# Altium schematic symbol library boost_converter_SchLib.SchLib: 9 symbols
Pins are listed as number, name and electrical type; pins without a type are passive.

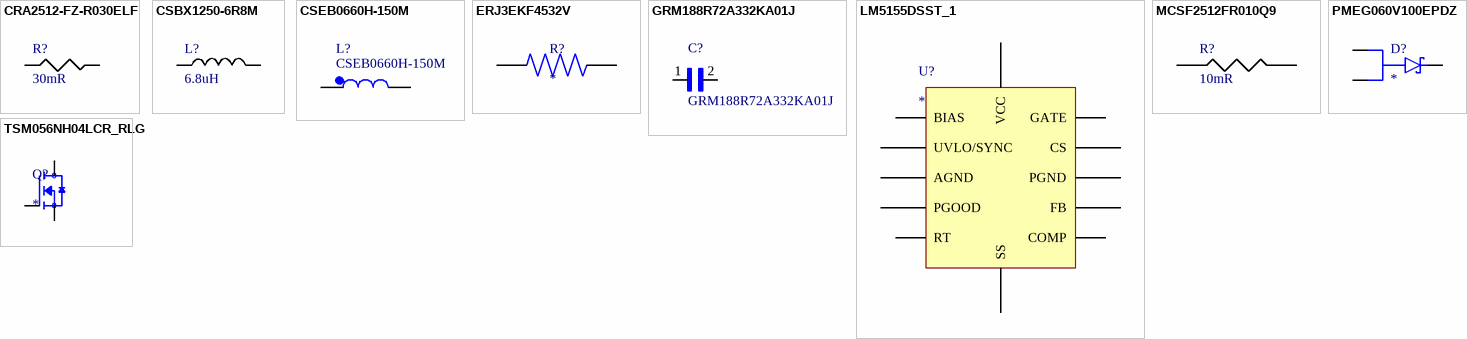
[diagram p0: symbols CRA2512-FZ-R030ELF to TSM056NH04LCR_RLG]

## CRA2512-FZ-R030ELF
designator R?, comment 30mR
Res Metal Alloy 2512 0.03 Ohm 1% 3W ±50ppm/C Pad SMD T/R Automotive AEC-Q200; Manufacturer: Bourns; Manufacturer Part Number: CRA2512-FZ-R030ELF; Value: 30mΩ; Temperature Coefficient: 50ppm/°C; Supplier: Avnet; Supplier Part Number: CRA2512-FZ-R030ELF; RoHS: Compliant; Category: Chip SMD Resistors; Stock: 28000; Pricing: 4000=0.20541, 8000=0.20133, 16000=0.1974, 32000=0.19363, 64000=0.12768 (USD); Case/Package: 2512; Case Code (Imperial): 2512; Case Code (Metric): 6432; China RoHS: Compliant; Composition: Metal Alloy, Metal Strip; Contact Plating: Tin; Country of Origin: Taiwan; Depth: 3.2mm; Export Control Classification Number (ECCN) Code: EAR99; Features: Moisture Resistant; Height: 700µm; Harmonized Tariff Schedule (HTS) Code: 8533.21.00.30; Introduction Date: 2008-05-23; Length: 6.4mm; Lifecycle Status: Production; Max Operating Temperature: 170°C; Max Power Dissipation: 3W; Military Standard: Not; Min Operating Temperature: -55°C; Mounting Technology: Surface Mount; Pins: 2; Number of Terminals: 2; Number of Terminations: 2; Packaging: Tape & Reel; Power Rating: 3W; Radiation Hardening: No; Ratings: AEC-Q200; REACH SVHC: Unaffected; Schedule B: 8533210025, 8533290000, 8533290000|8533290000|8533290000|8533290000|8533290000|8533290000|8533290000|8533290000, 8533290000|8533290000|8533290000|8533290000|8533290000|8533290000|8533290000|8533290000|8533290000; Termination: SMD/SMT; Tolerance: 1%; Weight: 40.511469mg; Width: 3.2mm; ComponentLink1URL: https://datasheet.octopart.com:443/CRA2512-FZ-R030ELF-Bourns-datasheet-169407838.pdf?src-supplier=IHS; ComponentLink1Description: https://datasheet.octopart.com:443/CRA2512-FZ-R030ELF-Bourns-datasheet-169407838.pdf?src-supplier=IHS; ComponentLink2URL: https://datasheet.octopart.com:443/CRA2512-FZ-R030ELF-Bourns-datasheet-68301994.pdf?src-supplier=Burklin+Elektronik; ComponentLink2Description: https://datasheet.octopart.com:443/CRA2512-FZ-R030ELF-Bourns-datasheet-68301994.pdf?src-supplier=Burklin+Elektronik; ComponentLink3URL: https://datasheet.octopart.com:443/CRA2512-FZ-R030ELF-Bourns-datasheet-32543139.pdf?src-supplier=element14+APAC; ComponentLink3Description: https://datasheet.octopart.com:443/CRA2512-FZ-R030ELF-Bourns-datasheet-32543139.pdf?src-supplier=element14+APAC; ComponentLink4URL: https://datasheet.octopart.com:443/CRA2512-FZ-R030ELF-Bourns-datasheet-15983344.pdf?src-supplier=element14+APAC; ComponentLink4Description: https://datasheet.octopart.com:443/CRA2512-FZ-R030ELF-Bourns-datasheet-15983344.pdf?src-supplier=element14+APAC; ComponentLink5URL: https://datasheet.octopart.com:443/CRA2512-FZ-R030ELF-Bourns-datasheet-26822206.pdf?src-supplier=Farnell; ComponentLink5Description: https://datasheet.octopart.com:443/CRA2512-FZ-R030ELF-Bourns-datasheet-26822206.pdf?src-supplier=Farnell; ComponentLink6URL: https://datasheet.octopart.com:443/CRA2512-FZ-R030ELF-Bourns-datasheet-21630808.pdf?src-supplier=Farnell; ComponentLink6Description: https://datasheet.octopart.com:443/CRA2512-FZ-R030ELF-Bourns-datasheet-21630808.pdf?src-supplier=Farnell; ComponentLink7URL: https://datasheet.octopart.com:443/CRA2512-FZ-R030ELF-Bourns-datasheet-154729667.pdf?src-supplier=Electro+Sonic; ComponentLink7Description: https://datasheet.octopart.com:443/CRA2512-FZ-R030ELF-Bourns-datasheet-154729667.pdf?src-supplier=Electro+Sonic; ComponentLink8URL: https://datasheet.octopart.com:443/CRA2512-FZ-R030ELF-Bourns-datasheet-8519302.pdf?src-supplier=RS+(Formerly+Allied+Electronics); ComponentLink8Description: https://datasheet.octopart.com:443/CRA2512-FZ-R030ELF-Bourns-datasheet-8519302.pdf?src-supplier=RS+(Formerly+Allied+Electronics); ComponentLink9URL: https://datasheet.octopart.com:443/CRA2512-FZ-R030ELF-Bourns-datasheet-57227053.pdf?src-supplier=RS+(Formerly+Allied+Electronics); ComponentLink9Description: https://datasheet.octopart.com:443/CRA2512-FZ-R030ELF-Bourns-datasheet-57227053.pdf?src-supplier=RS+(Formerly+Allied+Electronics); ComponentLink10URL: https://datasheet.octopart.com:443/CRA2512-FZ-R030ELF-Bourns-datasheet-190051968.pdf?src-supplier=Newark; ComponentLink10Description: https://datasheet.octopart.com:443/CRA2512-FZ-R030ELF-Bourns-datasheet-190051968.pdf?src-supplier=Newark; ComponentLink11URL: https://datasheet.octopart.com:443/CRA2512-FZ-R030ELF-Bourns-datasheet-10633406.pdf?src-supplier=element14; ComponentLink11Description: https://datasheet.octopart.com:443/CRA2512-FZ-R030ELF-Bourns-datasheet-10633406.pdf?src-supplier=element14; ComponentLink12URL: http://sigma.octopart.com:80/conflict_mineral_statement/Bourns-company-36.pdf?src-supplier=Compliance+Statements; ComponentLink12Description: http://sigma.octopart.com:80/conflict_mineral_statement/Bourns-company-36.pdf?src-supplier=Compliance+Statements
footprint R_s
pins: 12, 13

## CSBX1250-6R8M
designator L?, comment 6.8uH
SMD High Current Power Inductor; Manufacturer: Codaca; Manufacturer Part Number: CSBX1250-6R8M; Supplier: DigiKey; Supplier Part Number: 4044-CSBX1250-6R8MCT-ND; Category: Fixed Inductors; Stock: 400; Pricing: 1=2.76, 10=2.273, 25=2.1028, 50=1.9828, 100=1.8695, 250=1.72976, 500=1.683 (USD)
pins: 10, 11

## CSEB0660H-150M
designator L?
MANUFACTURER: Codaca; UNIT: mm; MAXIMUM_PACKAGE_HEIGHT: 6.10mm; PARTREV: 09/15/2025; SOURCE_URL: https://www.snapeda.com/parts/CSEB0660H-150M/Codaca/view-part/?ref=snap; STANDARD: Manufacturer Recommendations; Value: *
footprint *IND_CSEB0660H-150M
pins: 1, 2

## ERJ3EKF4532V
designator R?
45.3 kOhms Â±1% 0.1W, 1/10W Chip Resistor 0603 (1608 Metric) Automotive AEC-Q200 Thick Film; MF: Panasonic; MP: ERJ3EKF4532V; SnapEDA_Link: https://www.snapeda.com/parts/ERJ3EKF4532V/Panasonic/view-part/?ref=snap; Package: 1608-2 Panasonic; Value: *; Check_prices: https://www.snapeda.com/parts/ERJ3EKF4532V/Panasonic/view-part/?ref=eda
footprint RES_ERJ3EKF4532V
pins: 1, 2

## GRM188R72A332KA01J
designator C?
SOURCE_URL: https://www.snapeda.com/parts/GRM188R72A332KA01J/Murata/view-part/?ref=snap; Value: *
footprint *CAPC1608X90N
pins: 1, 2

## LM5155DSST_1
designator U?
MF: {'manufacturer': u'Texas Instruments'}; MP: LM5155DSST; Package: None; Price: None; Value: *; Availability: Unavailable
footprint IC_LM5155DSST
pins: 14 BIAS, 15 UVLO/SYNC, 16 AGND, 17 PGOOD, 18 RT, 19 VCC, 20 SS, 21 COMP, 22 FB, 23 PGND, 24 CS, 25 GATE

## MCSF2512FR010Q9
designator R?, comment 10mR
0.01 OHM 1% 3W 50PPM; Manufacturer: Resion; Manufacturer Part Number: MCSF2512FR010Q9; Value: 10mΩ; Supplier: DigiKey; Supplier Part Number: 4506-MCSF2512FR010Q9DKR-ND; Category: Chip SMD Resistors; Stock: 2843; Pricing: 1=0.37, 10=0.236, 25=0.1996, 50=0.1768, 100=0.1573, 250=0.13604, 500=0.1227, 1000=0.11135 (USD); Power Rating: 3W; Tolerance: 1%
pins: 8, 9

## PMEG060V100EPDZ
designator D?
Diode Schottky 60 V 10A Surface Mount CFP15; MF: Nexperia USA; MP: PMEG060V100EPDZ; SnapEDA_Link: https://www.snapeda.com/parts/PMEG060V100EPDZ/Nexperia/view-part/?ref=snap; Package: CFP15-3 Nexperia USA Inc.; Value: *; Check_prices: https://www.snapeda.com/parts/PMEG060V100EPDZ/Nexperia/view-part/?ref=eda
footprint DIO_PMEG060V100EPDZ
pins: 1 A1, 2 A2, 3 K

## TSM056NH04LCR_RLG
designator Q?
N-Channel Power Î©SFET 40V, 54A, 5.6mÎ©; MF: Taiwan Semiconductor; MP: TSM056NH04LCR RLG; SnapEDA_Link: https://www.snapeda.com/parts/TSM056NH04LCR%20RLG/taiwan/view-part/?ref=snap; Package: NON-STANDARD-5 Taiwan Semiconductor; Value: *; Check_prices: https://www.snapeda.com/parts/TSM056NH04LCR%20RLG/taiwan/view-part/?ref=eda
footprint TRANS_TSM056NH04LCR_RLG
pins: 1 S, 2 S, 3 S, 4 G, 5_8 D